# Altium footprint library 0451005PMRL.PcbLib: 3 footprints
Each footprint in its own frame and in the unit in brackets; x right, y up, seen from the top. Pads: shape width x height; smd on the part's side, far side on the other; paste and mask are expansions set on the pad; w line width, h text height; cw(c..) or ccw(c..) is an arc to the next point about the centre after c.
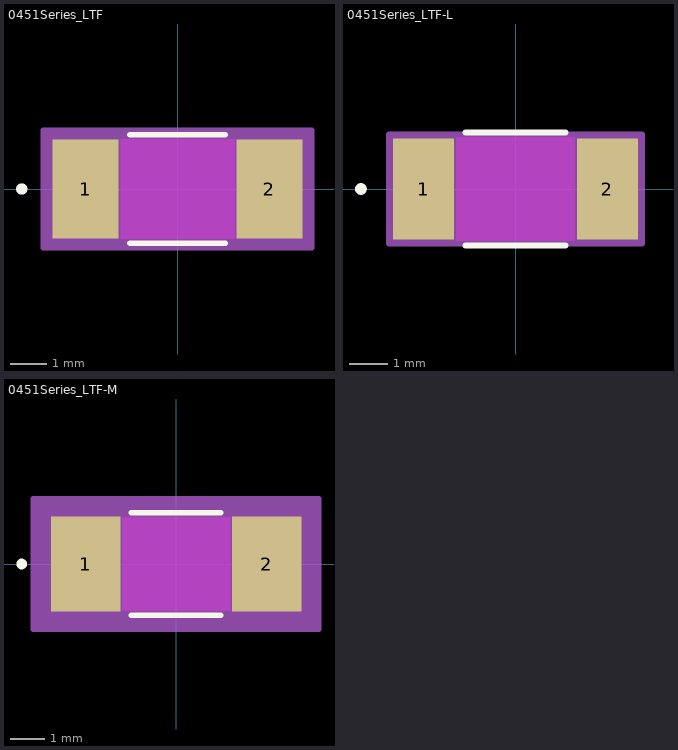
[diagram p0: the footprints below, top view; thin cyan lines are the x and y axes]

## 0451Series_LTF [mil]
pads (2):
  rect 70.78x106 smd paste+0 mask+0: 1(-98.39,0) 2(98.39,0)
Top Layer keep-out:
  region: -61,-51 -61,51 61,51 61,-51
Top Overlay:
  circle w6: c-166.78,0 r3
  lines w6: -50.89,-58 50.89,-58 ; -50.89,58 50.89,58
  text ".Designator" at -137.5,-25 h50
Keep-Out Layer:
  region: -61,-53 -61,53 61,53 61,-53
Mechanical 13:
  circle w1: c-110,0 r3
  lines w1: -120,-53 -120,53 ; -120,-53 -63,-53 -63,53 -120,53 ; -120,-53 120,-53 ; -120,-53 -120,53 ; -120,53 120,53 ; 120,-53 63,-53 63,53 120,53 ; 120,-53 120,53 ; 120,-53 120,53
  text ".Designator" at -137.5,-25 h50
Mechanical 15:
  region: 143.78,-63 -143.78,-63 -143.78,63 143.78,63
  lines w6: -143.78,-63 -143.78,63 143.78,63 143.78,-63 -143.78,-63
3D body "0451Series_LTF.step": height 105.98, standoff 0, extent -120,-52.99 120,52.99

## 0451Series_LTF-L [mil]
pads (2):
  rect 62.91x104.03 smd paste+0 mask+0: 1(-94.45,0) 2(94.45,0)
Top Layer keep-out:
  region: -61,-51 -61,51 61,51 61,-51
Top Overlay:
  circle w6: c-158.91,0 r3
  lines w6: -51.35,-58 51.35,-58 ; -51.35,58 51.35,58
  text ".Designator" at -137.5,-25 h50
Keep-Out Layer:
  region: -61,-53 -61,53 61,53 61,-53
Mechanical 13:
  circle w1: c-110,0 r3
  lines w1: -120,-53 -120,53 ; -120,-53 -63,-53 -63,53 -120,53 ; -120,-53 120,-53 ; -120,-53 -120,53 ; -120,53 120,53 ; 120,-53 63,-53 63,53 120,53 ; 120,-53 120,53 ; 120,-53 120,53
  text ".Designator" at -137.5,-25 h50
Mechanical 15:
  region: 129.91,-56.02 -129.91,-56.02 -129.91,56.02 129.91,56.02
  lines w6: -129.91,-56.02 -129.91,56.02 129.91,56.02 129.91,-56.02 -129.91,-56.02
3D body "0451Series_LTF.step": height 105.98, standoff 0, extent -120,-52.99 120,52.99

## 0451Series_LTF-M [mil]
pads (2):
  rect 78.65x107.97 smd paste+0 mask+0: 1(-102.33,0) 2(102.33,0)
Top Layer keep-out:
  region: -61,-51 -61,51 61,51 61,-51
Top Overlay:
  circle w6: c-174.65,0 r3
  lines w6: -50.53,-58 50.53,-58 ; -50.53,58 50.53,58
  text ".Designator" at -137.5,-25 h50
Keep-Out Layer:
  region: -61,-53 -61,53 61,53 61,-53
Mechanical 13:
  circle w1: c-110,0 r3
  lines w1: -120,-53 -120,53 ; -120,-53 -63,-53 -63,53 -120,53 ; -120,-53 120,-53 ; -120,-53 -120,53 ; -120,53 120,53 ; 120,-53 63,-53 63,53 120,53 ; 120,-53 120,53 ; 120,-53 120,53
  text ".Designator" at -137.5,-25 h50
Mechanical 15:
  region: 161.65,-73.98 -161.65,-73.98 -161.65,73.98 161.65,73.98
  lines w6: -161.65,-73.98 -161.65,73.98 161.65,73.98 161.65,-73.98 -161.65,-73.98
3D body "0451Series_LTF.step": height 105.98, standoff 0, extent -120,-52.99 120,52.99